# Altium footprint library Footprint_Vlad.PcbLib: 392 footprints (part 1 of 25)
Each footprint in its own frame and in the unit in brackets; x right, y up, seen from the top. Pads: shape width x height; smd on the part's side, far side on the other; paste and mask are expansions set on the pad; w line width, h text height; cw(c..) or ccw(c..) is an arc to the next point about the centre after c.
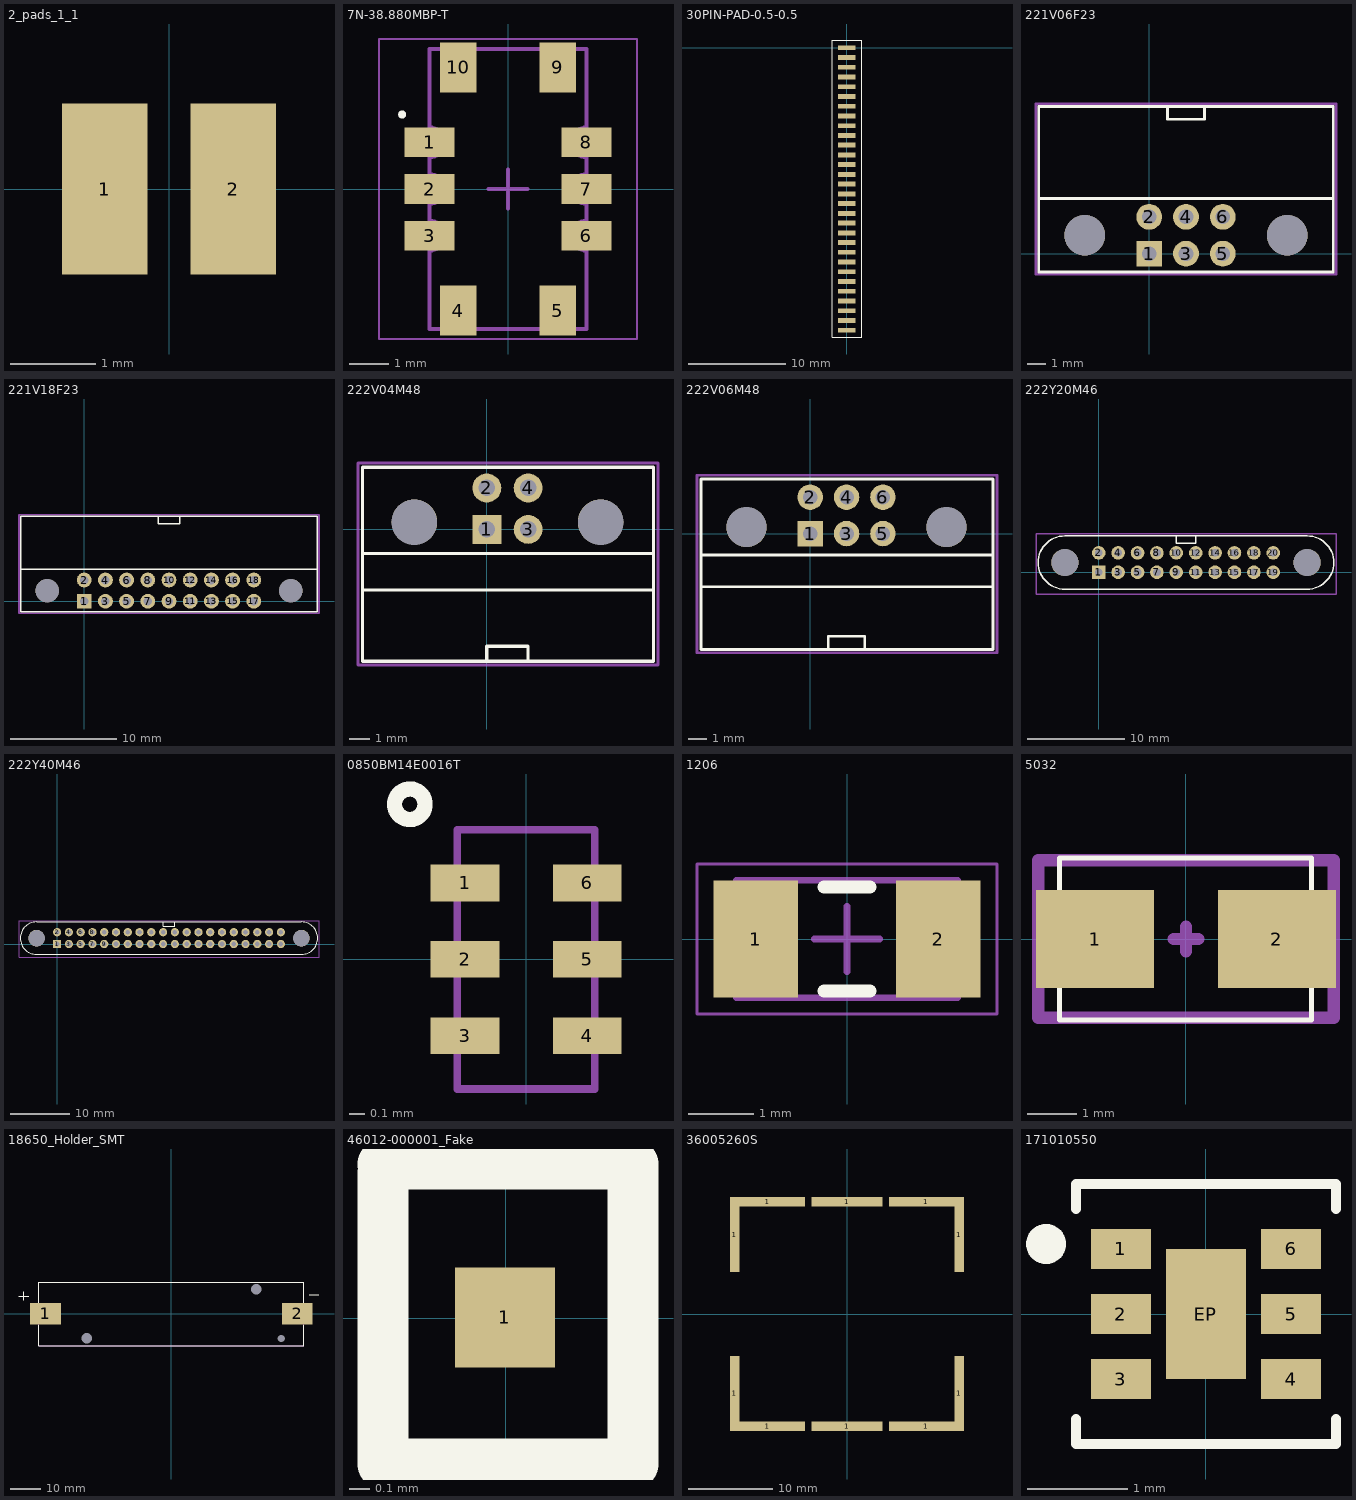
[diagram p0: the footprints below, top view; thin cyan lines are the x and y axes]

## 2_pads_1_1 [mm]
pads (2):
  rect 1x2 smd: 1(-0.75,0) 2(0.75,0)

## 7N-38.880MBP-T [mm] "Chip Array, Concave, 6-Leads, Pitch 1,19mm,  Body 7,00x5,00mm,  IPC Medium Density"
height 2
pads (10):
  rect 1.28x0.76 smd: 1(-2,1.19) 2(-2,0) 3(-2,-1.19) 6(2,-1.19) 7(2,0) 8(2,1.19)
  rect 0.94x1.28 smd: 4(-1.27,-3.1) 5(1.27,-3.1) 9(1.27,3.1) 10(-1.27,3.1)
Top Overlay:
  circle w0.1: c-2.7,1.9 r0.05
Assembly Top:
  lines w0.1: -2,-3.575 -2,-1.57 ccw(c-2,-1.19) -2,-0.81 -2,-0.38 ccw(c-2,0) -2,0.38 -2,0.81 ccw(c-2,1.19) -2,1.57 -2,3.575 2,3.575 2,1.57 ccw(c2,1.19) 2,0.81 2,0.38 ccw(c2,0) 2,-0.38 2,-0.81 ccw(c2,-1.19) 2,-1.57 2,-3.575 -2,-3.575
Courtyard Top:
  lines w0.05: -3.29,-3.825 -3.29,3.825 3.29,3.825 3.29,-3.825 -3.29,-3.825
  lines w0.1: -0.5,0 0.5,0 ; 0,-0.5 0,0.5
3D body "7N-38.880MBP-T.step": height 2, standoff 0, extent -2.625,-3.575 2.625,3.575

## 30PIN-PAD-0.5-0.5 [mm]
pads (30):
  rect 1.8x0.5 smd: 1(0,0) 2(0,-1) 3(0,-2) 4(0,-3) 5(0,-4) 6(0,-5) 7(0,-6) 8(0,-7) 9(0,-8) 10(0,-9) 11(0,-10) 12(0,-11) 13(0,-12) 14(0,-13) 15(0,-14) 16(0,-15) 17(0,-16) 18(0,-17) 19(0,-18) 20(0,-19) 21(0,-20) 22(0,-21) 23(0,-22) 24(0,-23) 25(0,-24) 26(0,-25) 27(0,-26) 28(0,-27) 29(0,-28) 30(0,-29)
Top Overlay:
  lines w0.1: -1.46,-29.74 1.54,-29.74 1.54,0.76 -1.46,0.76 -1.46,-29.74

## 221V06F23 [mm] "NICOMATIC 6 pin with 2mm PLD option"
pads (8):
  rect 1.4x1.4 hole 0.8: 1(0,0)
  round 1.4 hole 0.8: 2(0,2) 3(2,0) 4(2,2) 5(4,0) 6(4,2)
  round 2.2 hole 2.2 unplated: ""(-3.5,1) ""(7.5,1)
Top Overlay:
  lines w0.15: -6,3 10,3 ; 1,8 1,7.3 3,7.3 3,8 ; -6,-1 10,-1 10,8 -6,8 -6,-1
Courtyard Top:
  lines w0.15: -6.15,-1.125 -6.15,8.15 10.15,8.15 10.15,-1.125 -6.15,-1.125
3D body "222S06M16.STEP": height 6, standoff 0.5, extent -6,4.25 10,12.75
3D body "221V06F23.STEP": height 6.03, standoff -3.27, extent -6,-0.975 10,8

## 221V18F23 [mm] "NICOMATIC 18 pin with 2mm PLD option"
pads (20):
  rect 1.4x1.4 hole 0.8: 1(0,0)
  round 1.4 hole 0.8: 2(0,2) 3(2,0) 4(2,2) 5(4,0) 6(4,2) 7(6,0) 8(6,2) 9(8,0) 10(8,2) 11(10,0) 12(10,2) 13(12,0) 14(12,2) 15(14,0) 16(14,2) 17(16,0) 18(16,2)
  round 2.2 hole 2.2 unplated: ""(-3.5,1) ""(19.5,1)
Top Overlay:
  lines w0.15: -6,3 22,3 ; 7,8 7,7.3 9,7.3 9,8 ; -6,-1 22,-1 22,8 -6,8 -6,-1
Courtyard Top:
  lines w0.15: -6.15,-1.125 -6.15,8.15 22.15,8.15 22.15,-1.125 -6.15,-1.125
3D body "222S18M16.STEP": height 6, standoff 0.5, extent -6,4.25 22,12.75
3D body "221V18F23.STEP": height 6.03, standoff -3.27, extent -6,-0.975 22,8

## 222V04M48 [mm] "NICOMATIC 4 pin with 2mm PLD option"
pads (6):
  rect 1.4x1.4 hole 0.8: 1(0,0)
  round 1.4 hole 0.8: 2(0,2) 3(2,0) 4(2,2)
  round 2.2 hole 2.2 unplated: ""(-3.5,0.35) ""(5.5,0.35)
Top Overlay:
  lines w0.15: -5.975,-1.175 8.025,-1.175 ; -5.95,-2.925 8.05,-2.925 ; 0,-6.35 0,-5.65 2,-5.65 2,-6.35 ; -6,-6.375 8.05,-6.375 8.05,3 -6,3 -6,-6.375
Courtyard Top:
  lines w0.15: -6.225,-6.55 -6.225,3.2 8.275,3.2 8.275,-6.55 -6.225,-6.55
3D body "222V04M48.STEP": height 6.02, standoff -3.58, extent -6,-6.373 8,2.373
3D body "221S04F61.STEP": height 5.98, standoff -0.02, extent -5.975,-11.55 8.025,1.95

## 222V06M48 [mm] "NICOMATIC 6 pin with 2mm PLD option"
pads (8):
  rect 1.4x1.4 hole 0.8: 1(0,0)
  round 1.4 hole 0.8: 2(0,2) 3(2,0) 4(2,2) 5(4,0) 6(4,2)
  round 2.2 hole 2.2 unplated: ""(-3.5,0.35) ""(7.5,0.35)
Top Overlay:
  lines w0.15: -5.975,-1.175 10.05,-1.175 ; -5.95,-2.925 10.05,-2.925 ; 1,-6.35 1,-5.65 3,-5.65 3,-6.35 ; -6,-6.375 -6,3 10.05,3 10.05,-6.375 -6,-6.375
Courtyard Top:
  lines w0.15: -6.225,-6.55 -6.225,3.2 10.275,3.2 10.275,-6.55 -6.225,-6.55
3D body "222V06M48.STEP": height 6.01, standoff -3.59, extent -6,-6.346 10,2.4
3D body "221S06F61.STEP": height 6.02, standoff 0.02, extent -6.002,-11.5 9.998,2

## 222Y20M46 [mm] "NICOMATIC 20 pin with 2mm PLD option"
pads (22):
  rect 1.4x1.4 hole 0.8: 1(0,0)
  round 1.4 hole 0.8: 2(0,2) 3(2,0) 4(2,2) 5(4,0) 6(4,2) 7(6,0) 8(6,2) 9(8,0) 10(8,2) 11(10,0) 12(10,2) 13(12,0) 14(12,2) 15(14,0) 16(14,2) 17(16,0) 18(16,2) 19(18,0) 20(18,2)
  round 2.8 hole 2.8 unplated: ""(-3.5,1) ""(21.5,1)
Top Overlay:
  lines w0.15: -3.5,-1.75 cw(c-3.5,1) -3.5,3.75 ; -3.499,-1.75 21.487,-1.75 ; -3.499,3.749 21.501,3.749 ; 8,3.7 8,3 10,3 10,3.7 ; 21.5,-1.75 ccw(c21.5,1) 21.5,3.75
Courtyard Top:
  lines w0.15: -6.475,-2.25 24.475,-2.25 24.475,3.95 -6.475,3.95 -6.475,-2.25
3D body "221S20F60.STEP": height 10.3, standoff -0.4, extent -6.027,-2.222 23.973,3.778
3D body "222Y20M46.STEP": height 5.21, standoff -5.69, extent -6.008,-1.75 23.992,3.75

## 222Y40M46 [mm] "NICOMATIC 40 pin with 2mm PLD option"
pads (42):
  rect 1.4x1.4 hole 0.8: 1(0,0)
  round 1.4 hole 0.8: 2(0,2) 3(2,0) 4(2,2) 5(4,0) 6(4,2) 7(6,0) 8(6,2) 9(8,0) 10(8,2) 11(10,0) 12(10,2) 13(12,0) 14(12,2) 15(14,0) 16(14,2) 17(16,0) 18(16,2) 19(18,0) 20(18,2) 21(20,0) 22(20,2) 23(22,0) 24(22,2) 25(24,0) 26(24,2) 27(26,0) 28(26,2) 29(28,0) 30(28,2) 31(30,0) 32(30,2) 33(32,0) 34(32,2) 35(34,0) 36(34,2) 37(36,0) 38(36,2) 39(38,0) 40(38,2)
  round 2.8 hole 2.8 unplated: ""(-3.5,1) ""(41.5,1)
Top Overlay:
  lines w0.15: -3.5,-1.75 cw(c-3.5,1) -3.5,3.75 ; -3.499,-1.75 41.491,-1.75 ; -3.499,3.749 41.503,3.749 ; 18,3.7 18,3 20,3 20,3.7 ; 41.5,-1.75 ccw(c41.5,1) 41.5,3.75
Courtyard Top:
  lines w0.15: -6.475,-2.25 -6.475,3.95 44.475,3.95 44.475,-2.25 -6.475,-2.25
3D body "222Y40M46.STEP": height 5.21, standoff -5.69, extent -6,-1.75 44,3.75
3D body "221S40F60.STEP": height 10.35, standoff -0.35, extent -5.999,-2.249 44.001,3.751

## 0850BM14E0016T [mm]
pads (6):
  rect 0.45x0.24 smd: 1(-0.4,0.5) 2(-0.4,0) 3(-0.4,-0.5) 4(0.4,-0.5) 5(0.4,0) 6(0.4,0.5)
Top Overlay:
  circle w0.1: c-0.762,1.016 r0.1
Mechanical 13:
  lines w0.05: -0.45,-0.85 -0.45,0 -0.45,0.85 0,0.85 0.45,0.85 0.45,0 0.45,-0.85 0,-0.85 -0.45,-0.85
Mechanical 15:
  text ".Designator" at -0.51,1.112 h1.52
3D body: height 0.7, standoff 0, extent -0.45,-0.85 0.45,0.85

## 1206 [mm] "Chip Capacitor, 2-Leads, Body 3.20x1.60mm, IPC Medium Density"
height 1.4
pads (2):
  rect 1.3x1.8 smd: 1(-1.4,0) 2(1.4,0)
Top Overlay:
  lines w0.2: -0.35,-0.8 0.35,-0.8 ; -0.35,0.8 0.35,0.8
Mechanical 13:
  lines w0.1: -1.7,-0.9 -1.7,0.9 1.7,0.9 1.7,-0.9 -1.7,-0.9
Mechanical 15:
  lines w0.05: -2.3,-1.15 -2.3,1.15 2.3,1.15 2.3,-1.15 -2.3,-1.15
  lines w0.1: -0.5,0 0.5,0 ; 0,-0.5 0,0.5
  text ".Designator" at -2.3,1.3 h1.52
3D body "CAPC3216N.step": height 1.4, standoff 0, extent -1.7,-0.9 1.7,0.9

## 5032 [mm]
pads (2):
  rect 2.4x2 smd: 1(-1.85,0) 2(1.85,0)
Top Overlay:
  lines w0.1: -2.575,-1.65 2.55,-1.65 2.55,1.65 -2.575,1.65 -2.575,-1.65
Mechanical 15:
  lines w0.254: -0.254,0 0.254,0 ; 0,-0.254 0,0.254 ; -3,-1.6 -3,1.6 3,1.6 3,-1.6 -3,-1.6
  text ".Designator" at -3,2 h1.52
3D body "User Library-ABM3-1.STEP": height 1.3, standoff 0, extent -2.5,-1.575 2.5,1.625

## 18650_Holder_SMT [mm]
pads (5):
  rect 10x7 smd: 1(-41,0) 2(41,0)
  round 0.3 hole 3.45 paste-50 mask-50: 3(27.6,8) 4(-27.6,-8)
  round 0.3 hole 2.39 paste-50 mask-50: 5(35.82,-8)
Top Overlay:
  lines w0.15: -49.6,5.8 -46.4,5.8 ; -48,4.5 -48,7.2 ; -43.2,-3.7 -43.2,-10.4 43.2,-10.4 43.2,-3.7 ; -43.2,3.7 -43.2,10.3 43.2,10.3 43.2,3.7 ; 45,6.2 48.1,6.2
Mechanical 15:
  lines w0.15: -43.205,-10.325 43.205,-10.325 43.205,10.325 -43.205,10.325 -43.205,-10.325
3D body "User Library-KEYELCO_1042.STEP": height 15.06, standoff -3.23, extent -43.027,-10.325 42.977,10.325

## 46012-000001_Fake [mm] "Placeholder for BOM"
height 3.43
pads (1):
  rect 0.5x0.5 smd: 1(-0.004,0.004)
Top Overlay:
  lines w0.254: -0.614,0.726 -0.614,-0.73 0.636,-0.73 0.636,0.77 -0.614,0.77

## 36005260S [mm]
pads (10):
  rect 1.1x8.9 smd: 1(-13.3,-9.398) 1(-13.3,9.398) 1(13.3,-9.398) 1(13.3,9.398)
  rect 8.9x1.1 smd: 1(-9.398,-13.3) 1(-9.398,13.3) 1(9.398,-13.3) 1(9.398,13.3)
  rect 8.4x1.1 smd: 1(0,-13.3) 1(0,13.3)
3D body "Download_STP_WE-SHC-36005260S (rev1).stp": height 2, standoff 0, extent -13.335,-13.335 13.335,13.335

## 171010550 [mm] "Variable Step Down MicroModule, body 2.5x2.5mm"
height 1.21
pads (7):
  rect 0.6x0.4 smd: 1(-0.85,0.65) 2(-0.85,0) 3(-0.85,-0.65) 4(0.85,-0.65) 5(0.85,0) 6(0.85,0.65)
  rect 0.8x1.3 smd: EP(0,0)
Top Overlay:
  circle w0.2: c-1.6,0.7 r0.1
  lines w0.1: -1.3,-1.05 -1.3,-1.3 1.3,-1.3 1.3,-1.05 ; -1.3,1.05 -1.3,1.3 1.3,1.3 1.3,1.05
3D body "171010550 (rev1).stp": height 1.21, standoff 0, extent -1.25,-1.25 1.25,1.25